# Altium schematic symbol library TCAL9539RTWR.SchLib: 1 symbol
Pins are listed as number, name and electrical type; pins without a type are passive.

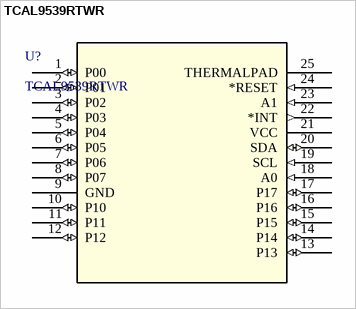
[diagram p0: symbol TCAL9539RTWR]

## TCAL9539RTWR
designator U?
16-bit low-voltage IÂ²C-bus and SMBus I/O expander with interrupt, reset and agile I/O configuration 24-WQFN -40 to 125; Manufacturer_Name: Texas Instruments; Copyright: Copyright (C) 2026 Ultra Librarian. All rights reserved.; Manufacturer_Part_Number: TCAL9539RTWR; Datasheet: https://www.ti.com/lit/gpn/tcal9539; RefDes: RefDes; Type: Type
footprint WQFN24_RTW-J_TEX
pins: 1 P00 (io), 2 P01 (io), 3 P02 (io), 4 P03 (io), 5 P04 (io), 6 P05 (io), 7 P06 (io), 8 P07 (io), 9 GND (power), 10 P10 (io), 11 P11 (io), 12 P12 (io), 13 P13 (io), 14 P14 (io), 15 P15 (io), 16 P16 (io), 17 P17 (io), 18 A0 (in), 19 SCL (in), 20 SDA (io), 21 VCC (power), 22 *INT (out), 23 A1 (in), 24 *RESET (in), 25 THERMALPAD